# Altium footprint library PCB_Lib.PcbLib: 38 footprints (part 1 of 3)
Each footprint in its own frame and in the unit in brackets; x right, y up, seen from the top. Pads: shape width x height; smd on the part's side, far side on the other; paste and mask are expansions set on the pad; w line width, h text height; cw(c..) or ccw(c..) is an arc to the next point about the centre after c.
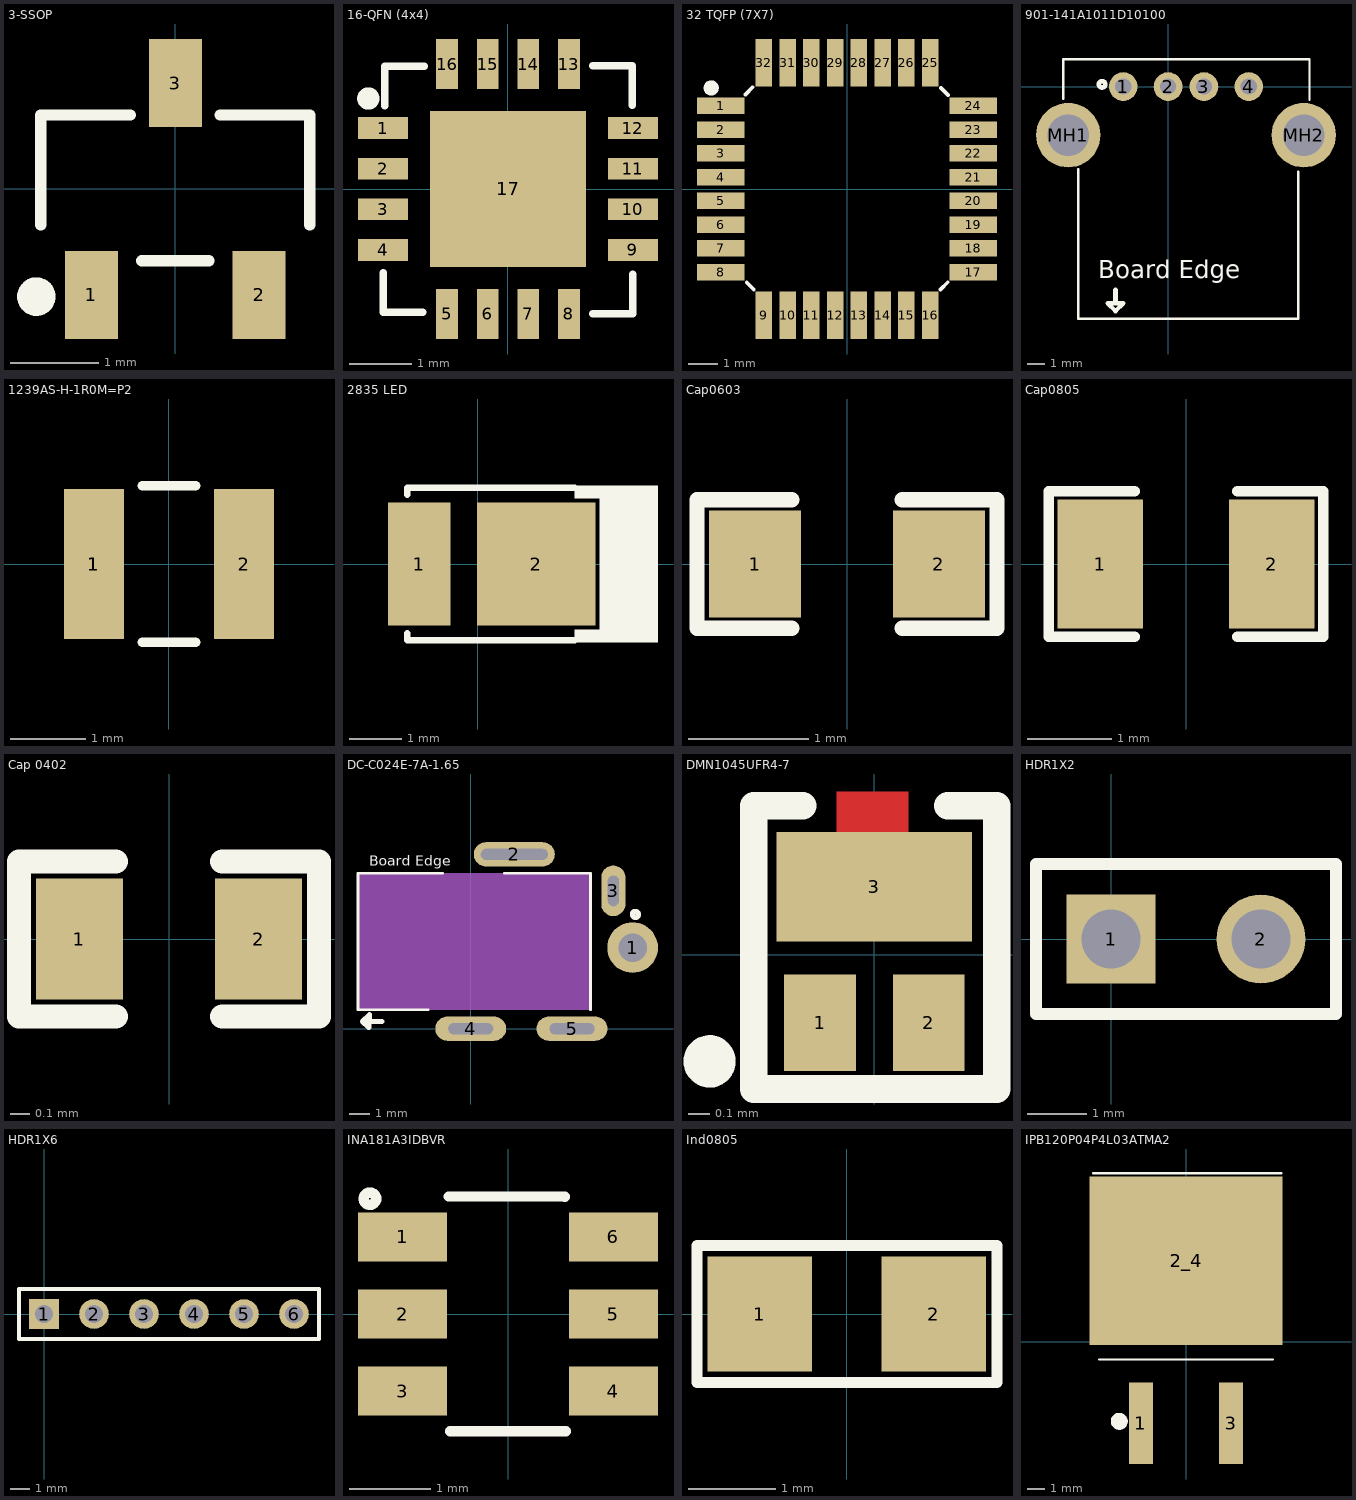
[diagram p0: the footprints below, top view; thin cyan lines are the x and y axes]

## 3-SSOP [mm]
pads (3):
  rect 0.6x1 smd: 1(-0.95,-1.2) 2(0.95,-1.2) 3(0,1.2)
Top Overlay:
  circle w0.254: c-1.575,-1.219 r0.092
  lines w0.127: -1.524,-0.406 -1.524,0.838 -0.508,0.838 ; -0.381,-0.813 0.381,-0.813 ; 0.508,0.838 1.524,0.838 1.524,-0.406
3D body "SSOP3_ROM.step": height 1.23, standoff -0.02, extent -1.46,-1.397 1.46,1.397

## 16-QFN (4x4) [mm] "battery management IC 16-QFN"
pads (17):
  rect 0.8x0.35 smd: 1(-2,0.975) 2(-2,0.325) 3(-2,-0.325) 4(-2,-0.975) 9(2,-0.975) 10(2,-0.325) 11(2,0.325) 12(2,0.975)
  rect 0.35x0.8 smd: 5(-0.975,-2) 6(-0.325,-2) 7(0.325,-2) 8(0.975,-2) 13(0.975,2) 14(0.325,2) 15(-0.325,2) 16(-0.975,2)
  rect 2.5x2.5 smd: 17(0,0)
Top Overlay:
  circle w0.254: c-2.235,1.448 r0.051
  lines w0.12: -1.997,-1.338 -1.997,-1.973 -1.362,-1.973 ; -1.973,1.329 -1.973,1.964 -1.338,1.964 ; 1.357,1.973 1.992,1.973 1.992,1.338 ; 1.36,-1.995 1.995,-1.995 1.995,-1.36
3D body "ALSRobot-QFN16 4x4.STEP": height 0.92, standoff 0, extent -2,-2 2,2

## 32 TQFP (7X7) [mm] "IC MCU 8BIT 32KB FLASH 32TQFP"
pads (32):
  rect 1.6x0.55 smd: 1(-4.25,2.8) 2(-4.25,2) 3(-4.25,1.2) 4(-4.25,0.4) 5(-4.25,-0.4) 6(-4.25,-1.2) 7(-4.25,-2) 8(-4.25,-2.8) 17(4.25,-2.8) 18(4.25,-2) 19(4.25,-1.2) 20(4.25,-0.4) 21(4.25,0.4) 22(4.25,1.2) 23(4.25,2) 24(4.25,2.8)
  rect 0.55x1.6 smd: 9(-2.8,-4.25) 10(-2,-4.25) 11(-1.2,-4.25) 12(-0.4,-4.25) 13(0.4,-4.25) 14(1.2,-4.25) 15(2,-4.25) 16(2.8,-4.25) 25(2.8,4.25) 26(2,4.25) 27(1.2,4.25) 28(0.4,4.25) 29(-0.4,4.25) 30(-1.2,4.25) 31(-2,4.25) 32(-2.8,4.25)
Top Overlay:
  circle w0.254: c-4.572,3.404 r0.127
  lines w0.127: -3.421,3.183 -3.181,3.423 ; -3.377,-3.146 -3.136,-3.387 ; 3.149,-3.382 3.389,-3.141 ; 3.163,3.404 3.403,3.164
3D body "ATMEGA328P-AU--3DModel-STEP-56544.STEP": height 1.18, standoff -0.02, extent -4.5,-4.5 4.5,4.5

## 901-141A1011D10100 [mm] "USB - Type A 4 USB 2.0 Female"
pads (6):
  round 1.6 hole 0.9: 1(-2.5,0) 2(0,0) 3(2,0) 4(4.5,0)
  round 3.6 hole 2.3: MH1(-5.57,-2.71) MH2(7.57,-2.71)
Top Overlay:
  circle w0.254: c-3.683,0.127 r0.18
  lines w0.127: -5.855,-0.696 -5.855,1.524 7.897,1.524 7.897,-0.741 ; -5.007,-4.613 -5.007,-12.954 7.268,-12.954 7.268,-4.752
  lines w0.254: -2.934,-11.328 -2.934,-12.09 ; -2.527,-12.116 -2.934,-12.522 -3.365,-12.09 -2.934,-12.09 ; -2.502,-12.09 -2.934,-12.09
  text "Board Edge" at -3.886,-10.69 h1
3D body "usb_2_a_90.stp": height 7.66, standoff -3.3, extent -6.884,-12.976 8.916,1.524

## 1239AS-H-1R0M=P2 [mm] "3A 1uH ±20% 59mO 1008 Inductors (SMD) ROHS"
pads (3):
  rect 0.8x2 smd: 1(-1,0) 1(-1,0) 2(1,0)
Top Overlay:
  lines w0.127: -0.356,-1.041 0.356,-1.041 ; -0.356,1.041 0.356,1.041
3D body "1239AS-H-1R0M=P2.STEP": height 1.2, standoff 0, extent -1.25,-1 1.25,1

## 2835 LED [mm] "1W LED SMD"
pads (2):
  rect 1.19x2.34 smd: 1(-1.112,0)
  rect 2.26x2.34 smd: 2(1.112,0)
Top Overlay:
  rectangle: 2.311,-1.499 3.429,1.499
  rectangle: 1.844,1.245 2.388,1.499
  rectangle: 1.844,-1.499 2.388,-1.245
  lines w0.127: -1.347,-1.321 -1.347,-1.451 1.844,-1.451 ; -1.347,1.321 -1.347,1.451 1.844,1.451
3D body "User Library-LED_2835_Samsung_SPMWH1228.STEP": height 0.7, standoff 0, extent -1.468,-1.4 2.027,1.4

## Cap0603 [mil]
pads (2):
  rect 30x35 smd mask+2.36: 1(-30,0) 2(30,0)
Top Overlay:
  lines w5: -18,-21 -49,-21 -49,21 -18,21 ; 18,-21 49,-21 49,21 18,21
3D body "User Library-CAPC1608X09.step": height 34.25, standoff -1.18, extent -31.51,-15.75 31.49,15.74

## Cap0805 [mil] "SMD 0805"
pads (2):
  rect 40x60 smd mask+2.76: 1(-40,0) 2(40,0)
Top Overlay:
  lines w5: -24,-34 -64,-34 -64,34 -24,34 ; 24,-34 64,-34 64,34 24,34
3D body "User Library-0805 SMD Capacitor.step": height 30, standoff -0.79, extent -39.36,-24.6 39.38,24.61

## Cap 0402 [mil]
pads (2):
  rect 18x25 smd mask+2.36: 1(-18.5,0) 2(18.5,0)
Top Overlay:
  lines w5: -11,-16 -31,-16 -31,16 -11,16 ; 11,-16 31,-16 31,16 11,16
3D body "User Library-Capacitor 0402.step": height 18.5, standoff -1.18, extent -19.68,-9.84 19.7,9.85

## DC-C024E-7A-1.65 [mm] "7A Jack DCPowerReceptacle 4.3mm 1.65mm"
pads (5):
  round 2.5 hole 1.4: 1(7.99,4)
  oval 4x1.2 hole 0.55 slot 3.3 at 0 deg: 2(2.15,8.6)
  oval 1.2x2.5 hole 0.55 slot 1.5 at 90 deg: 3(7.04,6.8)
  oval 3.5x1.2 hole 0.55 slot 2.21 at 0 deg: 4(0,0) 5(5,0)
Top Overlay:
  circle w0.254: c8.128,5.639 r0.148
  pour cut-out: 5.909,7.66
  lines w0.127: -2.108,0.94 -5.563,0.94 -5.563,7.66 -1.372,7.66 ; 1.658,7.66 5.909,7.66 5.909,0.94
  lines w0.254: -5.029,0.33 -5.029,0.051 -5.334,0.356 -5.004,0.686 -5.004,0.356 -4.394,0.356
  text "Board Edge" at -5.004,8.041 h0.5
Mechanical 1:
  pour cut-out: 5.909,7.66 -5.563,7.66 -5.563,0.94 5.909,0.94
  text "Board Cut Out" at -3.658,4.089 h0.5
3D body "dc-c024e-7a-1_65.stp": height 4.45, standoff -1.35, extent -5.552,-0.229 8.448,8.773

## DMN1045UFR4-7 [mm]
pads (3):
  rect 0.33x0.445 smd: 1(-0.25,-0.312) 2(0.25,-0.312)
  rect 0.9x0.505 smd: 3(0,0.313)
Top Layer:
  rectangle: -0.174,0.551 0.156,0.751
Top Overlay:
  circle w0.127: c-0.758,-0.49 r0.057
  lines w0.127: -0.33,0.686 -0.555,0.686 -0.555,-0.617 0.563,-0.617 0.563,0.686 0.338,0.686
3D body "DFN1010H4-3.stp": height 0.37, standoff -0.02, extent -0.5,-0.373 0.5,0.627

## HDR1X2 [mm] "CONN HEADER VERT 2POS 2.54MM"
pads (2):
  rect 1.5x1.5 hole 1: 1(0,0)
  round 1.5 hole 1: 2(2.54,0)
Top Overlay:
  lines w0.2: -1.27,-1.27 -1.27,1.27 3.81,1.27 3.81,-1.27 -1.27,-1.27
3D body "User Library-Header1x2.STEP": height 8.44, standoff -2.54, extent -1.27,-1.27 3.81,1.27

## HDR1X6 [mm] "Connector; Header; 6 Position"
pads (6):
  rect 1.5x1.5 hole 0.9: 1(0,0)
  round 1.5 hole 0.9: 2(2.54,0) 3(5.08,0) 4(7.62,0) 5(10.16,0) 6(12.7,0)
Top Overlay:
  lines w0.2: -1.27,-1.27 13.97,-1.27 13.97,1.27 -1.27,1.27 -1.27,-1.27
3D body "User Library-Header_Male_6Pin.STEP": height 8.54, standoff -3, extent -1.27,-1.245 13.97,1.245

## INA181A3IDBVR [mm] "IC CURR SENSE 1 CIRCUIT SOT23-6"
pads (6):
  rect 1.1x0.6 smd: 1(-1.3,0.95) 2(-1.3,0) 3(-1.3,-0.95) 4(1.3,-0.95) 5(1.3,0) 6(1.3,0.95)
Top Overlay:
  circle w0.127: c-1.702,1.422 r0.076
  lines w0.127: -0.734,1.448 0.698,1.448 ; -0.716,-1.448 0.716,-1.448
3D body "INA181A3IDBVR.STEP": height 1.45, standoff 0, extent -1.4,-1.45 1.4,1.45

## Ind0805 [mm] "Inductor 0805"
pads (2):
  rect 1.2x1.32 smd: 1(-1,0) 2(1,0)
Top Overlay:
  lines w0.127: -1.723,-0.787 -1.723,0.787 1.727,0.787 1.727,-0.787 -1.723,-0.787
3D body "45637.stp": height 0.47, standoff -0.03, extent -1,-0.625 1,0.625

## IPB120P04P4L03ATMA2 [mm] "MOSFET P-CH 40V 120A TO263-3"
pads (3):
  rect 1.35x4.6 smd: 1(-2.54,-4.575) 3(2.54,-4.575)
  rect 10.9x9.5 smd: 2_4(0,4.575)
Top Overlay:
  circle w0.5: c-3.759,-4.468 r0.229
  lines w0.127: -5.232,9.5 5.359,9.5 ; -4.902,-0.991 4.902,-0.991
3D body "Infineon-STP_PG-TO263-3-2-P-v01_00-EN.stp": height 4.51, standoff 0, extent -5,-5.849 5,9.101